# Altium footprint library Connector.PcbLib: 272 footprints (part 7 of 17)
Each footprint in its own frame and in the unit in brackets; x right, y up, seen from the top. Pads: shape width x height; smd on the part's side, far side on the other; paste and mask are expansions set on the pad; w line width, h text height; cw(c..) or ccw(c..) is an arc to the next point about the centre after c.
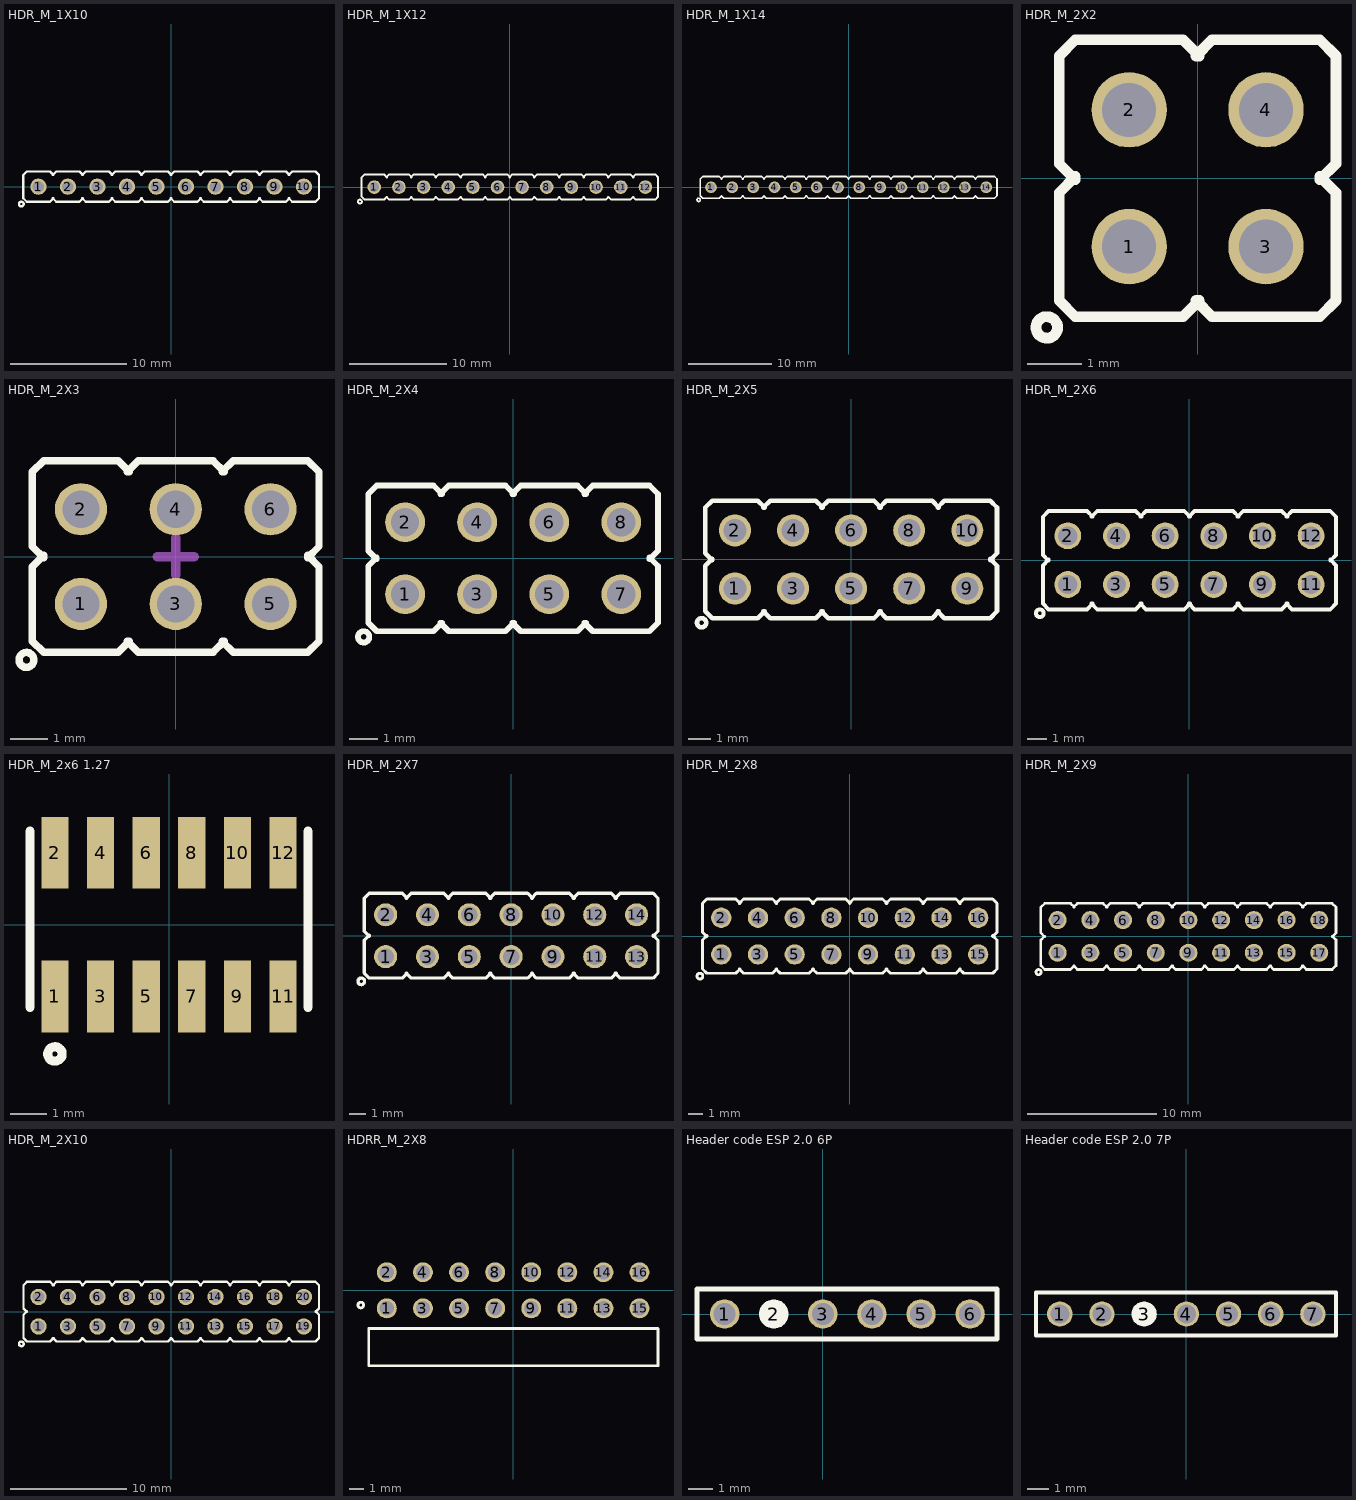
[diagram p6: the footprints below, top view; thin cyan lines are the x and y axes]

## HDR_M_1X10 [mm] "Connector; Header; 10 Position"
pads (10):
  round 1.4 / inner round 1.4 / far side oval 1.4x2.2 hole 1 mask+0.1: 1(-11.43,0) 2(-8.89,0) 3(-6.35,0) 4(-3.81,0) 5(-1.27,0) 6(1.27,0) 7(3.81,0) 8(6.35,0) 9(8.89,0) 10(11.43,0)
Top Overlay:
  circle w0.2: c-12.9,-1.5 r0.2
  lines w0.2: -10.19,-1 -9.89,-1.3 -7.89,-1.3 -7.59,-1 ; -10.19,1 -9.89,1.3 -7.89,1.3 -7.59,1 ; -10.13,-1 -10.43,-1.3 -12.43,-1.3 -12.73,-1 -12.73,1 -12.43,1.3 -10.43,1.3 -10.13,1 ; -7.65,-1 -7.35,-1.3 -5.35,-1.3 -5.05,-1 ; -7.65,1 -7.35,1.3 -5.35,1.3 -5.05,1 ; -5.11,-1 -4.81,-1.3 -2.81,-1.3 -2.51,-1 ; -5.11,1 -4.81,1.3 -2.81,1.3 -2.51,1 ; -2.57,-1 -2.27,-1.3 -0.27,-1.3 0.03,-1 ; -2.57,1 -2.27,1.3 -0.27,1.3 0.03,1 ; -0.03,-1 0.27,-1.3 2.27,-1.3 2.57,-1 ; -0.03,1 0.27,1.3 2.27,1.3 2.57,1 ; 2.51,-1 2.81,-1.3 4.81,-1.3 5.11,-1 ; 2.51,1 2.81,1.3 4.81,1.3 5.11,1 ; 5.05,-1 5.35,-1.3 7.35,-1.3 7.65,-1 ; 5.05,1 5.35,1.3 7.35,1.3 7.65,1 ; 7.59,-1 7.89,-1.3 9.89,-1.3 10.19,-1 ; 7.59,1 7.89,1.3 9.89,1.3 10.19,1 ; 10.13,-1 10.43,-1.3 12.43,-1.3 12.73,-1 12.73,1 12.43,1.3 10.43,1.3 10.13,1
Top Designator:
  text ".Designator" at -3.895,-0.544 h1.52
3D body "pin_header_aw140-eg-g10d.stp": height 8.2, standoff -3, extent -12.7,-1.249 12.7,1.249

## HDR_M_1X12 [mm] "Connector; Header; 14 Position"
pads (12):
  round 1.4 / inner round 1.4 / far side oval 1.4x2.2 hole 1 mask+0.1: 1(-13.97,0) 2(-11.43,0) 3(-8.89,0) 4(-6.35,0) 5(-3.81,0) 6(-1.27,0) 7(1.27,0) 8(3.81,0) 9(6.35,0) 10(8.89,0) 11(11.43,0) 12(13.97,0)
Top Overlay:
  circle w0.2: c-15.45,-1.5 r0.2
  lines w0.2: -12.73,-1 -12.43,-1.3 -10.43,-1.3 -10.13,-1 ; -12.73,1 -12.43,1.3 -10.43,1.3 -10.13,1 ; -12.67,-1 -12.97,-1.3 -14.97,-1.3 -15.27,-1 -15.27,1 -14.97,1.3 -12.97,1.3 -12.67,1 ; -10.19,-1 -9.89,-1.3 -7.89,-1.3 -7.59,-1 ; -10.19,1 -9.89,1.3 -7.89,1.3 -7.59,1 ; -7.65,-1 -7.35,-1.3 -5.35,-1.3 -5.05,-1 ; -7.65,1 -7.35,1.3 -5.35,1.3 -5.05,1 ; -5.11,-1 -4.81,-1.3 -2.81,-1.3 -2.51,-1 ; -5.11,1 -4.81,1.3 -2.81,1.3 -2.51,1 ; -2.57,-1 -2.27,-1.3 -0.27,-1.3 0.03,-1 ; -2.57,1 -2.27,1.3 -0.27,1.3 0.03,1 ; -0.03,-1 0.27,-1.3 2.27,-1.3 2.57,-1 ; -0.03,1 0.27,1.3 2.27,1.3 2.57,1 ; 2.51,-1 2.81,-1.3 4.81,-1.3 5.11,-1 ; 2.51,1 2.81,1.3 4.81,1.3 5.11,1 ; 5.05,-1 5.35,-1.3 7.35,-1.3 7.65,-1 ; 5.05,1 5.35,1.3 7.35,1.3 7.65,1 ; 7.59,-1 7.89,-1.3 9.89,-1.3 10.19,-1 ; 7.59,1 7.89,1.3 9.89,1.3 10.19,1 ; 10.13,-1 10.43,-1.3 12.43,-1.3 12.73,-1 ; 10.13,1 10.43,1.3 12.43,1.3 12.73,1 ; 12.67,-1 12.97,-1.3 14.97,-1.3 15.27,-1 15.27,1 14.97,1.3 12.97,1.3 12.67,1
Top Designator:
  text ".Designator" at -3.9,-0.544 h1.52
3D body "pin_header_aw140-eg-g06d.stp": height 8.2, standoff -3, extent -15.24,-1.249 0,1.249
3D body "pin_header_aw140-eg-g06d.stp": height 8.2, standoff -3, extent 0,-1.249 15.24,1.249

## HDR_M_1X14 [mm] "Connector; Header; 14 Position"
pads (14):
  round 1.4 / inner round 1.4 / far side oval 1.4x2.2 hole 1 mask+0.1: 1(-16.51,0) 2(-13.97,0) 3(-11.43,0) 4(-8.89,0) 5(-6.35,0) 6(-3.81,0) 7(-1.27,0) 8(1.27,0) 9(3.81,0) 10(6.35,0) 11(8.89,0) 12(11.43,0) 13(13.97,0) 14(16.51,0)
Top Overlay:
  circle w0.2: c-17.99,-1.5 r0.2
  lines w0.2: -15.27,-1 -14.97,-1.3 -12.97,-1.3 -12.67,-1 ; -15.27,1 -14.97,1.3 -12.97,1.3 -12.67,1 ; -15.21,-1 -15.51,-1.3 -17.51,-1.3 -17.81,-1 -17.81,1 -17.51,1.3 -15.51,1.3 -15.21,1 ; -12.73,-1 -12.43,-1.3 -10.43,-1.3 -10.13,-1 ; -12.73,1 -12.43,1.3 -10.43,1.3 -10.13,1 ; -10.19,-1 -9.89,-1.3 -7.89,-1.3 -7.59,-1 ; -10.19,1 -9.89,1.3 -7.89,1.3 -7.59,1 ; -7.65,-1 -7.35,-1.3 -5.35,-1.3 -5.05,-1 ; -7.65,1 -7.35,1.3 -5.35,1.3 -5.05,1 ; -5.11,-1 -4.81,-1.3 -2.81,-1.3 -2.51,-1 ; -5.11,1 -4.81,1.3 -2.81,1.3 -2.51,1 ; -2.57,-1 -2.27,-1.3 -0.27,-1.3 0.03,-1 ; -2.57,1 -2.27,1.3 -0.27,1.3 0.03,1 ; -0.03,-1 0.27,-1.3 2.27,-1.3 2.57,-1 ; -0.03,1 0.27,1.3 2.27,1.3 2.57,1 ; 2.51,-1 2.81,-1.3 4.81,-1.3 5.11,-1 ; 2.51,1 2.81,1.3 4.81,1.3 5.11,1 ; 5.05,-1 5.35,-1.3 7.35,-1.3 7.65,-1 ; 5.05,1 5.35,1.3 7.35,1.3 7.65,1 ; 7.59,-1 7.89,-1.3 9.89,-1.3 10.19,-1 ; 7.59,1 7.89,1.3 9.89,1.3 10.19,1 ; 10.13,-1 10.43,-1.3 12.43,-1.3 12.73,-1 ; 10.13,1 10.43,1.3 12.43,1.3 12.73,1 ; 12.67,-1 12.97,-1.3 14.97,-1.3 15.27,-1 ; 12.67,1 12.97,1.3 14.97,1.3 15.27,1 ; 15.21,-1 15.51,-1.3 17.51,-1.3 17.81,-1 17.81,1 17.51,1.3 15.51,1.3 15.21,1
Top Designator:
  text ".Designator" at -3.9,-0.544 h1.52
3D body "pin_header_aw140-eg-g07d.stp": height 8.2, standoff -3, extent 0,-1.249 17.78,1.249
3D body "pin_header_aw140-eg-g07d.stp": height 8.2, standoff -3, extent -17.78,-1.249 0,1.249

## HDR_M_2X2 [mm] "Connector; Header; 2x2 Position"
pads (4):
  round 1.4 / inner round 1.4 / far side oval 1.4x2.2 hole 1: 1(-1.27,-1.27)
  round 1.4 / inner round 1.4 / far side oval 1.4x2.2 hole 1 mask+0.1: 2(-1.27,1.27) 3(1.27,-1.27) 4(1.27,1.27)
Top Overlay:
  circle w0.2: c-2.8,-2.77 r0.2
  lines w0.2: -2.27,-0.03 -2.57,0.27 -2.57,2.27 -2.27,2.57 -0.27,2.57 0.03,2.27 ; -2.27,0.03 -2.57,-0.27 -2.57,-2.27 -2.27,-2.57 -0.27,-2.57 0.03,-2.27 ; -0.03,-2.27 0.27,-2.57 2.27,-2.57 2.57,-2.27 2.57,-0.27 2.27,0.03 ; -0.03,2.27 0.27,2.57 2.27,2.57 2.57,2.27 2.57,0.27 2.27,-0.03
Top Designator:
  text ".Designator" at -3.925,-0.544 h1.52
3D body "pin_header_awl254-dg-g04d.stp": height 8.5, standoff -3, extent -2.54,-2.54 2.54,2.54

## HDR_M_2X3 [mm] "Connector; Header; 3x2 Position"
pads (6):
  round 1.4 / inner round 1.4 / far side oval 1.4x2.2 hole 1 mask+0.1: 1(-2.54,-1.27) 2(-2.54,1.27) 3(0,-1.27) 4(0,1.27) 5(2.54,-1.27) 6(2.54,1.27)
Top Overlay:
  circle w0.2: c-4,-2.77 r0.2
  lines w0.2: -3.54,-0.03 -3.84,0.27 -3.84,2.27 -3.54,2.57 -1.54,2.57 -1.24,2.27 ; -3.54,0.03 -3.84,-0.27 -3.84,-2.27 -3.54,-2.57 -1.54,-2.57 -1.24,-2.27 ; -1.3,-2.27 -1,-2.57 1,-2.57 1.3,-2.27 ; -1.3,2.27 -1,2.57 1,2.57 1.3,2.27 ; 1.24,-2.27 1.54,-2.57 3.54,-2.57 3.84,-2.27 3.84,-0.27 3.54,0.03 ; 1.24,2.27 1.54,2.57 3.54,2.57 3.84,2.27 3.84,0.27 3.54,-0.03
Top Designator:
  text ".Designator" at -3.89,-0.544 h1.52
Mechanical 15:
  lines w0.254: -0.5,0 0.5,0 ; 0,-0.5 0,0.5
3D body "pin_header_awl254-dg-g06d.stp": height 8.5, standoff -3, extent -3.81,-2.54 3.81,2.54

## HDR_M_2X4 [mm] "Male Header 2X04 with 2.54 mm Pitch"
pads (8):
  round 1.4 / inner round 1.4 / far side oval 1.4x2.2 hole 1 mask+0.1: 1(-3.81,-1.27) 2(-3.81,1.27) 3(-1.27,-1.27) 4(-1.27,1.27) 5(1.27,-1.27) 6(1.27,1.27) 7(3.81,-1.27) 8(3.81,1.27)
Top Overlay:
  circle w0.2: c-5.27,-2.77 r0.2
  lines w0.2: -4.81,-0.03 -5.11,0.27 -5.11,2.27 -4.81,2.57 -2.81,2.57 -2.51,2.27 ; -4.81,0.03 -5.11,-0.27 -5.11,-2.27 -4.81,-2.57 -2.81,-2.57 -2.51,-2.27 ; -2.57,-2.27 -2.27,-2.57 -0.27,-2.57 0.03,-2.27 ; -2.57,2.27 -2.27,2.57 -0.27,2.57 0.03,2.27 ; -0.03,-2.27 0.27,-2.57 2.27,-2.57 2.57,-2.27 ; -0.03,2.27 0.27,2.57 2.27,2.57 2.57,2.27 ; 2.51,-2.27 2.81,-2.57 4.81,-2.57 ; 2.51,2.27 2.81,2.57 4.81,2.57 ; 4.81,-0.03 5.11,0.27 5.11,2.27 ; 4.81,0.03 5.11,-0.27 5.11,-2.27 ; 4.81,-2.57 5.11,-2.27 ; 4.81,-2.57 5.11,-2.27 ; 4.81,2.57 5.11,2.27 ; 4.81,2.57 5.11,2.27
Top Designator:
  text ".Designator" at -3.89,-0.544 h1.52
3D body "pin_header_awl254-dg-g08d.stp": height 8.5, standoff -3, extent -5.08,-2.54 5.08,2.54

## HDR_M_2X5 [mm] "Male Header 2X05 with 2.54 mm Pitch"
pads (10):
  round 1.4 / inner round 1.4 / far side oval 1.4x2.2 hole 1: 1(-5.08,-1.27) 2(-5.08,1.27) 3(-2.54,-1.27) 4(-2.54,1.27) 5(0,-1.27) 6(0,1.27) 7(2.54,-1.27) 8(2.54,1.27) 9(5.08,-1.27) 10(5.08,1.27)
Top Overlay:
  circle w0.2: c-6.54,-2.77 r0.2
  lines w0.2: -6.08,-0.03 -6.38,0.27 -6.38,2.27 -6.08,2.57 -4.08,2.57 -3.78,2.27 ; -6.08,0.03 -6.38,-0.27 -6.38,-2.27 -6.08,-2.57 -4.08,-2.57 -3.78,-2.27 ; -3.84,-2.27 -3.54,-2.57 -1.54,-2.57 -1.24,-2.27 ; -3.84,2.27 -3.54,2.57 -1.54,2.57 -1.24,2.27 ; -1.3,-2.27 -1,-2.57 1,-2.57 1.3,-2.27 ; -1.3,2.27 -1,2.57 1,2.57 1.3,2.27 ; 1.24,-2.27 1.54,-2.57 3.54,-2.57 ; 1.24,2.27 1.54,2.57 3.54,2.57 ; 3.78,-2.27 4.08,-2.57 6.08,-2.57 ; 3.78,2.27 4.08,2.57 6.08,2.57 ; 6.08,-0.03 6.38,0.27 6.38,2.27 ; 6.08,0.03 6.38,-0.27 6.38,-2.27 ; 3.54,-2.57 3.84,-2.27 3.54,-2.57 ; 3.54,2.57 3.84,2.27 3.54,2.57 ; 6.08,-2.57 6.38,-2.27 ; 6.08,-2.57 6.38,-2.27 ; 6.08,-2.57 6.38,-2.27 ; 6.08,-2.57 6.38,-2.27 ; 6.08,2.57 6.38,2.27 ; 6.08,2.57 6.38,2.27 ; 6.08,2.57 6.38,2.27 ; 6.08,2.57 6.38,2.27
Top Designator:
  text ".Designator" at -3.89,-0.544 h1.52
3D body "pin_header_awl254-dg-g10d.stp": height 8.5, standoff -3, extent -6.35,-2.54 6.35,2.54

## HDR_M_2X6 [mm] "Male Header 2X06 with 2.54 mm Pitch"
pads (12):
  round 1.4 / inner round 1.4 / far side oval 1.4x2.2 hole 1: 1(-6.35,-1.27) 2(-6.35,1.27) 3(-3.81,-1.27) 4(-3.81,1.27) 5(-1.27,-1.27) 6(-1.27,1.27) 7(1.27,-1.27) 8(1.27,1.27) 9(3.81,-1.27) 10(3.81,1.27) 11(6.35,-1.27) 12(6.35,1.27)
Top Overlay:
  circle w0.2: c-7.81,-2.77 r0.2
  lines w0.2: -7.35,-0.03 -7.65,0.27 -7.65,2.27 -7.35,2.57 -5.35,2.57 -5.05,2.27 ; -7.35,0.03 -7.65,-0.27 -7.65,-2.27 -7.35,-2.57 -5.35,-2.57 -5.05,-2.27 ; -5.11,-2.27 -4.81,-2.57 -2.81,-2.57 -2.51,-2.27 ; -5.11,2.27 -4.81,2.57 -2.81,2.57 -2.51,2.27 ; -2.57,-2.27 -2.27,-2.57 -0.27,-2.57 0.03,-2.27 ; -2.57,2.27 -2.27,2.57 -0.27,2.57 0.03,2.27 ; -0.03,-2.27 0.27,-2.57 2.27,-2.57 ; -0.03,2.27 0.27,2.57 2.27,2.57 ; 2.51,-2.27 2.81,-2.57 4.81,-2.57 ; 2.51,2.27 2.81,2.57 4.81,2.57 ; 5.05,-2.27 5.35,-2.57 7.35,-2.57 ; 5.05,2.27 5.35,2.57 7.35,2.57 ; 7.35,-0.03 7.65,0.27 7.65,2.27 ; 7.35,0.03 7.65,-0.27 7.65,-2.27 ; 2.27,-2.57 2.57,-2.27 2.27,-2.57 ; 2.27,2.57 2.57,2.27 2.27,2.57 ; 4.81,-2.57 5.11,-2.27 ; 4.81,-2.57 5.11,-2.27 ; 4.81,-2.57 5.11,-2.27 ; 4.81,-2.57 5.11,-2.27 ; 4.81,2.57 5.11,2.27 ; 4.81,2.57 5.11,2.27 ; 4.81,2.57 5.11,2.27 ; 4.81,2.57 5.11,2.27 ; 7.35,-2.57 7.65,-2.27 ; 7.35,-2.57 7.65,-2.27 ; 7.35,-2.57 7.65,-2.27 ; 7.35,-2.57 7.65,-2.27 ; 7.35,-2.57 7.65,-2.27 ; 7.35,-2.57 7.65,-2.27 ; 7.35,-2.57 7.65,-2.27 ; 7.35,-2.57 7.65,-2.27 ; 7.35,2.57 7.65,2.27 ; 7.35,2.57 7.65,2.27 ; 7.35,2.57 7.65,2.27 ; 7.35,2.57 7.65,2.27 ; 7.35,2.57 7.65,2.27 ; 7.35,2.57 7.65,2.27 ; 7.35,2.57 7.65,2.27 ; 7.35,2.57 7.65,2.27
Top Designator:
  text ".Designator" at -3.89,-0.544 h1.52
3D body "pin_header_awl254-dg-g06d.stp": height 8.5, standoff -3, extent 0,-2.54 7.62,2.54
3D body "pin_header_awl254-dg-g06d.stp": height 8.5, standoff -3, extent -7.62,-2.54 0,2.54

## HDR_M_2x6 1.27 [mm]
pads (12):
  rect 0.76x2 smd: 1(-3.175,-2) 2(-3.175,2) 3(-1.905,-2) 4(-1.905,2) 5(-0.635,-2) 6(-0.635,2) 7(0.635,-2) 8(0.635,2) 9(1.905,-2) 10(1.905,2) 11(3.175,-2) 12(3.175,2)
Top Overlay:
  circle w0.254: c-3.175,-3.6 r0.2
  lines w0.254: -3.873,-2.3 -3.873,2.6 ; 3.873,-2.3 3.873,2.6
Top Designator:
  text ".Designator" at -3.71,-0.757 h1.52
3D body "SPHDS127-10-2_1.7.step": height 4.48, standoff 0.03, extent -2.555,-2.753 3.795,2.753
3D body "SPHDS127-10-2_1.7.step": height 4.48, standoff 0.03, extent -3.825,-2.753 2.525,2.753

## HDR_M_2X7 [mm] "Male Header 2X07 with 2.54 mm Pitch"
pads (14):
  round 1.4 / inner round 1.4 / far side oval 1.4x2.2 hole 1 mask+0.1: 1(-7.62,-1.27) 2(-7.62,1.27) 3(-5.08,-1.27) 4(-5.08,1.27) 5(-2.54,-1.27) 6(-2.54,1.27) 7(0,-1.27) 8(0,1.27) 9(2.54,-1.27) 10(2.54,1.27) 11(5.08,-1.27) 12(5.08,1.27) 13(7.62,-1.27) 14(7.62,1.27)
Top Overlay:
  circle w0.2: c-9.1,-2.77 r0.2
  lines w0.2: -8.62,-0.03 -8.92,0.27 -8.92,2.27 -8.62,2.57 -6.62,2.57 -6.32,2.27 ; -8.62,0.03 -8.92,-0.27 -8.92,-2.27 -8.62,-2.57 -6.62,-2.57 -6.32,-2.27 ; -6.38,-2.27 -6.08,-2.57 -4.08,-2.57 -3.78,-2.27 ; -6.38,2.27 -6.08,2.57 -4.08,2.57 -3.78,2.27 ; -3.84,-2.27 -3.54,-2.57 -1.54,-2.57 -1.24,-2.27 ; -3.84,2.27 -3.54,2.57 -1.54,2.57 -1.24,2.27 ; -1.3,-2.27 -1,-2.57 1,-2.57 1.3,-2.27 ; -1.3,2.27 -1,2.57 1,2.57 1.3,2.27 ; 1.24,-2.27 1.54,-2.57 3.54,-2.57 3.84,-2.27 ; 1.24,2.27 1.54,2.57 3.54,2.57 3.84,2.27 ; 3.78,-2.27 4.08,-2.57 6.08,-2.57 6.38,-2.27 ; 3.78,2.27 4.08,2.57 6.08,2.57 6.38,2.27 ; 6.32,-2.27 6.62,-2.57 8.62,-2.57 8.92,-2.27 8.92,-0.27 8.62,0.03 ; 6.32,2.27 6.62,2.57 8.62,2.57 8.92,2.27 8.92,0.27 8.62,-0.03
Top Designator:
  text ".Designator" at -3.9,-0.544 h1.52
3D body "pin_header_awl254-dg-g06d.stp": height 8.5, standoff -3, extent 1.27,-2.54 8.89,2.54
3D body "pin_header_awl254-dg-g08d.stp": height 8.5, standoff -3, extent -8.89,-2.54 1.27,2.54

## HDR_M_2X8 [mm] "Male Header 2X08 with 2.54 mm Pitch"
pads (16):
  round 1.4 / inner round 1.4 / far side oval 1.4x2.2 hole 1: 1(-8.89,-1.27) 2(-8.89,1.27) 3(-6.35,-1.27) 4(-6.35,1.27) 5(-3.81,-1.27) 6(-3.81,1.27) 7(-1.27,-1.27) 8(-1.27,1.27) 9(1.27,-1.27) 10(1.27,1.27) 11(3.81,-1.27) 12(3.81,1.27) 13(6.35,-1.27) 14(6.35,1.27) 15(8.89,-1.27) 16(8.89,1.27)
Top Overlay:
  circle w0.2: c-10.37,-2.77 r0.2
  lines w0.2: -9.89,-0.03 -10.19,0.27 -10.19,2.27 -9.89,2.57 -7.89,2.57 -7.59,2.27 ; -9.89,0.03 -10.19,-0.27 -10.19,-2.27 -9.89,-2.57 -7.89,-2.57 -7.59,-2.27 ; -7.65,-2.27 -7.35,-2.57 -5.35,-2.57 -5.05,-2.27 ; -7.65,2.27 -7.35,2.57 -5.35,2.57 -5.05,2.27 ; -5.11,-2.27 -4.81,-2.57 -2.81,-2.57 -2.51,-2.27 ; -5.11,2.27 -4.81,2.57 -2.81,2.57 -2.51,2.27 ; -2.57,-2.27 -2.27,-2.57 -0.27,-2.57 0.03,-2.27 ; -2.57,2.27 -2.27,2.57 -0.27,2.57 0.03,2.27 ; -0.03,-2.27 0.27,-2.57 2.27,-2.57 2.57,-2.27 ; -0.03,2.27 0.27,2.57 2.27,2.57 2.57,2.27 ; 2.51,-2.27 2.81,-2.57 4.81,-2.57 5.11,-2.27 ; 2.51,2.27 2.81,2.57 4.81,2.57 5.11,2.27 ; 5.05,-2.27 5.35,-2.57 7.35,-2.57 7.65,-2.27 ; 5.05,2.27 5.35,2.57 7.35,2.57 7.65,2.27 ; 7.59,-2.27 7.89,-2.57 9.89,-2.57 ; 7.59,2.27 7.89,2.57 9.89,2.57 ; 9.89,-0.03 10.19,0.27 10.19,2.27 ; 9.89,0.03 10.19,-0.27 10.19,-2.27 ; 9.89,-2.57 10.19,-2.27 ; 9.89,-2.57 10.19,-2.27 ; 9.89,2.57 10.19,2.27 ; 9.89,2.57 10.19,2.27
Top Designator:
  text ".Designator" at -3.9,-0.544 h1.52
3D body "pin_header_awl254-dg-g16d.stp": height 8.5, standoff -3, extent -10.16,-2.54 10.16,2.54

## HDR_M_2X9 [mm] "Male Header 2X09 with 2.54 mm Pitch"
pads (18):
  round 1.4 / inner round 1.4 / far side oval 1.4x2.2 hole 1: 1(-10.16,-1.27) 2(-10.16,1.27) 3(-7.62,-1.27) 4(-7.62,1.27) 5(-5.08,-1.27) 6(-5.08,1.27) 7(-2.54,-1.27) 8(-2.54,1.27) 9(0,-1.27) 10(0,1.27) 11(2.54,-1.27) 12(2.54,1.27) 13(5.08,-1.27) 14(5.08,1.27) 15(7.62,-1.27) 16(7.62,1.27) 17(10.16,-1.27) 18(10.16,1.27)
Top Overlay:
  circle w0.2: c-11.64,-2.77 r0.2
  lines w0.2: -11.16,-0.03 -11.46,0.27 -11.46,2.27 -11.16,2.57 -9.16,2.57 -8.86,2.27 ; -11.16,0.03 -11.46,-0.27 -11.46,-2.27 -11.16,-2.57 -9.16,-2.57 -8.86,-2.27 ; -8.92,-2.27 -8.62,-2.57 -6.62,-2.57 -6.32,-2.27 ; -8.92,2.27 -8.62,2.57 -6.62,2.57 -6.32,2.27 ; -6.38,-2.27 -6.08,-2.57 -4.08,-2.57 -3.78,-2.27 ; -6.38,2.27 -6.08,2.57 -4.08,2.57 -3.78,2.27 ; -3.84,-2.27 -3.54,-2.57 -1.54,-2.57 -1.24,-2.27 ; -3.84,2.27 -3.54,2.57 -1.54,2.57 -1.24,2.27 ; -1.3,-2.27 -1,-2.57 1,-2.57 1.3,-2.27 ; -1.3,2.27 -1,2.57 1,2.57 1.3,2.27 ; 1.24,-2.27 1.54,-2.57 3.54,-2.57 3.84,-2.27 ; 1.24,2.27 1.54,2.57 3.54,2.57 3.84,2.27 ; 3.78,-2.27 4.08,-2.57 6.08,-2.57 6.38,-2.27 ; 3.78,2.27 4.08,2.57 6.08,2.57 6.38,2.27 ; 6.32,-2.27 6.62,-2.57 8.62,-2.57 ; 6.32,2.27 6.62,2.57 8.62,2.57 ; 8.86,-2.27 9.16,-2.57 11.16,-2.57 ; 8.86,2.27 9.16,2.57 11.16,2.57 ; 11.16,-0.03 11.46,0.27 11.46,2.27 ; 11.16,0.03 11.46,-0.27 11.46,-2.27 ; 8.62,-2.57 8.92,-2.27 8.62,-2.57 ; 8.62,2.57 8.92,2.27 8.62,2.57 ; 11.16,-2.57 11.46,-2.27 ; 11.16,-2.57 11.46,-2.27 ; 11.16,-2.57 11.46,-2.27 ; 11.16,-2.57 11.46,-2.27 ; 11.16,2.57 11.46,2.27 ; 11.16,2.57 11.46,2.27 ; 11.16,2.57 11.46,2.27 ; 11.16,2.57 11.46,2.27
Top Designator:
  text ".Designator" at -3.9,-0.544 h1.52
3D body "pin_header_awl254-dg-g10d.stp": height 8.5, standoff -3, extent -1.27,-2.54 11.43,2.54
3D body "pin_header_awl254-dg-g08d.stp": height 8.5, standoff -3, extent -11.43,-2.54 -1.27,2.54

## HDR_M_2X10 [mm] "Male Header 2X10 with 2.54 mm Pitch"
pads (20):
  round 1.4 / inner round 1.4 / far side oval 1.4x2.2 hole 1: 1(-11.43,-1.27) 2(-11.43,1.27) 3(-8.89,-1.27) 4(-8.89,1.27) 5(-6.35,-1.27) 6(-6.35,1.27) 7(-3.81,-1.27) 8(-3.81,1.27) 9(-1.27,-1.27) 10(-1.27,1.27) 11(1.27,-1.27) 12(1.27,1.27) 13(3.81,-1.27) 14(3.81,1.27) 15(6.35,-1.27) 16(6.35,1.27) 17(8.89,-1.27) 18(8.89,1.27) 19(11.43,-1.27) 20(11.43,1.27)
Top Overlay:
  circle w0.2: c-12.91,-2.77 r0.2
  lines w0.2: -12.43,-0.03 -12.73,0.27 -12.73,2.27 -12.43,2.57 -10.43,2.57 -10.13,2.27 ; -12.43,0.03 -12.73,-0.27 -12.73,-2.27 -12.43,-2.57 -10.43,-2.57 -10.13,-2.27 ; -10.19,-2.27 -9.89,-2.57 -7.89,-2.57 -7.59,-2.27 ; -10.19,2.27 -9.89,2.57 -7.89,2.57 -7.59,2.27 ; -7.65,-2.27 -7.35,-2.57 -5.35,-2.57 -5.05,-2.27 ; -7.65,2.27 -7.35,2.57 -5.35,2.57 -5.05,2.27 ; -5.11,-2.27 -4.81,-2.57 -2.81,-2.57 -2.51,-2.27 ; -5.11,2.27 -4.81,2.57 -2.81,2.57 -2.51,2.27 ; -2.57,-2.27 -2.27,-2.57 -0.27,-2.57 0.03,-2.27 ; -2.57,2.27 -2.27,2.57 -0.27,2.57 0.03,2.27 ; -0.03,-2.27 0.27,-2.57 2.27,-2.57 2.57,-2.27 ; -0.03,2.27 0.27,2.57 2.27,2.57 2.57,2.27 ; 2.51,-2.27 2.81,-2.57 4.81,-2.57 5.11,-2.27 ; 2.51,2.27 2.81,2.57 4.81,2.57 5.11,2.27 ; 5.05,-2.27 5.35,-2.57 7.35,-2.57 ; 5.05,2.27 5.35,2.57 7.35,2.57 ; 7.59,-2.27 7.89,-2.57 9.89,-2.57 ; 7.59,2.27 7.89,2.57 9.89,2.57 ; 10.13,-2.27 10.43,-2.57 12.43,-2.57 ; 10.13,2.27 10.43,2.57 12.43,2.57 ; 12.43,-0.03 12.73,0.27 12.73,2.27 ; 12.43,0.03 12.73,-0.27 12.73,-2.27 ; 7.35,-2.57 7.65,-2.27 7.35,-2.57 ; 7.35,2.57 7.65,2.27 7.35,2.57 ; 9.89,-2.57 10.19,-2.27 ; 9.89,-2.57 10.19,-2.27 ; 9.89,-2.57 10.19,-2.27 ; 9.89,-2.57 10.19,-2.27 ; 9.89,2.57 10.19,2.27 ; 9.89,2.57 10.19,2.27 ; 9.89,2.57 10.19,2.27 ; 9.89,2.57 10.19,2.27 ; 12.43,-2.57 12.73,-2.27 ; 12.43,-2.57 12.73,-2.27 ; 12.43,-2.57 12.73,-2.27 ; 12.43,-2.57 12.73,-2.27 ; 12.43,2.57 12.73,2.27 ; 12.43,2.57 12.73,2.27 ; 12.43,2.57 12.73,2.27 ; 12.43,2.57 12.73,2.27
Top Designator:
  text ".Designator" at -3.9,-0.544 h1.52
3D body "pin_header_awl254-dg-g20d.stp": height 8.5, standoff -3, extent -12.7,-2.54 12.7,2.54

## HDRR_M_2X8 [mm] "Connector; Header; 8x2 Position"
height 7
pads (16):
  round 1.4 / inner round 1.4 / far side oval 1.4x2.2 hole 1: 1(-8.89,-1.27) 2(-8.89,1.27) 3(-6.35,-1.27) 4(-6.35,1.27) 5(-3.81,-1.27) 6(-3.81,1.27) 7(-1.27,-1.27) 8(-1.27,1.27) 9(1.27,-1.27) 10(1.27,1.27) 11(3.81,-1.27) 12(3.81,1.27) 13(6.35,-1.27) 14(6.35,1.27) 15(8.89,-1.27) 16(8.89,1.27)
Top Overlay:
  circle w0.2: c-10.72,-1.04 r0.2
  lines w0.2: -7.62,-5.31 -5.05,-5.31 ; -7.62,-2.7 -5.05,-2.7 ; -7.59,-5.31 -10.16,-5.31 -10.16,-2.7 -7.59,-2.7 ; -5.08,-5.31 -2.51,-5.31 ; -5.08,-2.7 -2.51,-2.7 ; -2.54,-5.31 0.03,-5.31 ; -2.54,-2.7 0.03,-2.7 ; 0,-5.31 2.57,-5.31 ; 0,-2.7 2.57,-2.7 ; 2.54,-5.31 5.11,-5.31 ; 2.54,-2.7 5.11,-2.7 ; 5.08,-5.31 7.65,-5.31 ; 5.08,-2.7 7.65,-2.7 ; 7.62,-5.31 10.19,-5.31 10.19,-2.7 7.62,-2.7
Top Designator:
  text ".Designator" at -4.075,-5.778 h1.52
3D body "2x1 Male Pin Header Angle.STEP": height 5.04, standoff -2.96, extent -10.165,-13.34 -7.62,1.56
3D body "2x1 Male Pin Header Angle.STEP": height 5.04, standoff -2.96, extent -7.625,-13.34 -5.08,1.56
3D body "2x1 Male Pin Header Angle.STEP": height 5.04, standoff -2.96, extent -5.085,-13.34 -2.54,1.56
3D body "2x1 Male Pin Header Angle.STEP": height 5.04, standoff -2.96, extent -2.545,-13.34 0,1.56
3D body "2x1 Male Pin Header Angle.STEP": height 5.04, standoff -2.96, extent -0.005,-13.34 2.54,1.56
3D body "2x1 Male Pin Header Angle.STEP": height 5.04, standoff -2.96, extent 2.535,-13.34 5.08,1.56
3D body "2x1 Male Pin Header Angle.STEP": height 5.04, standoff -2.96, extent 5.075,-13.34 7.62,1.56
3D body "2x1 Male Pin Header Angle.STEP": height 5.04, standoff -2.96, extent 7.615,-13.34 10.16,1.56

## Header code ESP 2.0 6P [mm]
pads (6):
  round 1.2 hole 0.9: 1(-4,0) 3(0,0) 4(2,0) 5(4,0) 6(6,0)
  round 1.2 on Top Overlay: 2(-2,0)
Top Overlay:
  lines w0.2: -5.128,-1.016 7.096,-1.016 7.096,1.016 -5.128,1.016 -5.128,-1.016
Top Designator:
  text ".Designator" at -2.726,-0.344 h1.52

## Header code ESP 2.0 7P [mm]
pads (7):
  round 1.2 hole 0.9: 1(-6,0) 2(-4,0) 4(0,0) 5(2,0) 6(4,0) 7(6,0)
  round 1.2 on Top Overlay: 3(-2,0)
Top Overlay:
  lines w0.2: -7.128,-1.016 -7.128,1.016 7.096,1.016 7.096,-1.016 -7.128,-1.016
Top Designator:
  text ".Designator" at -3.726,-0.344 h1.52